# Altium integrated library SZ1SMA5918BT3G.IntLib: 1 symbol
Pins are listed as number, name and electrical type; pins without a type are passive.

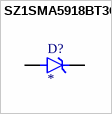
[diagram p0: symbol SZ1SMA5918BT3G]

## SZ1SMA5918BT3G
designator D?
Zener Diode 5.1 V 1.5 W Â±5% Surface Mount SMA; MF: ON Semiconductor; MP: SZ1SMA5918BT3G; SnapEDA_Link: https://www.snapeda.com/parts/SZ1SMA5918BT3G/Onsemi/view-part/?ref=snap; Package: SMA-2 ON Semiconductor; Value: *; Check_prices: https://www.snapeda.com/parts/SZ1SMA5918BT3G/Onsemi/view-part/?ref=eda
footprint DIOM5226X220N
pins: A, C